# Altium footprint library Package_DFN_QFN.PcbLib: 735 footprints (part 9 of 46)
Each footprint in its own frame and in the unit in brackets; x right, y up, seen from the top. Pads: shape width x height; smd on the part's side, far side on the other; paste and mask are expansions set on the pad; w line width, h text height; cw(c..) or ccw(c..) is an arc to the next point about the centre after c.
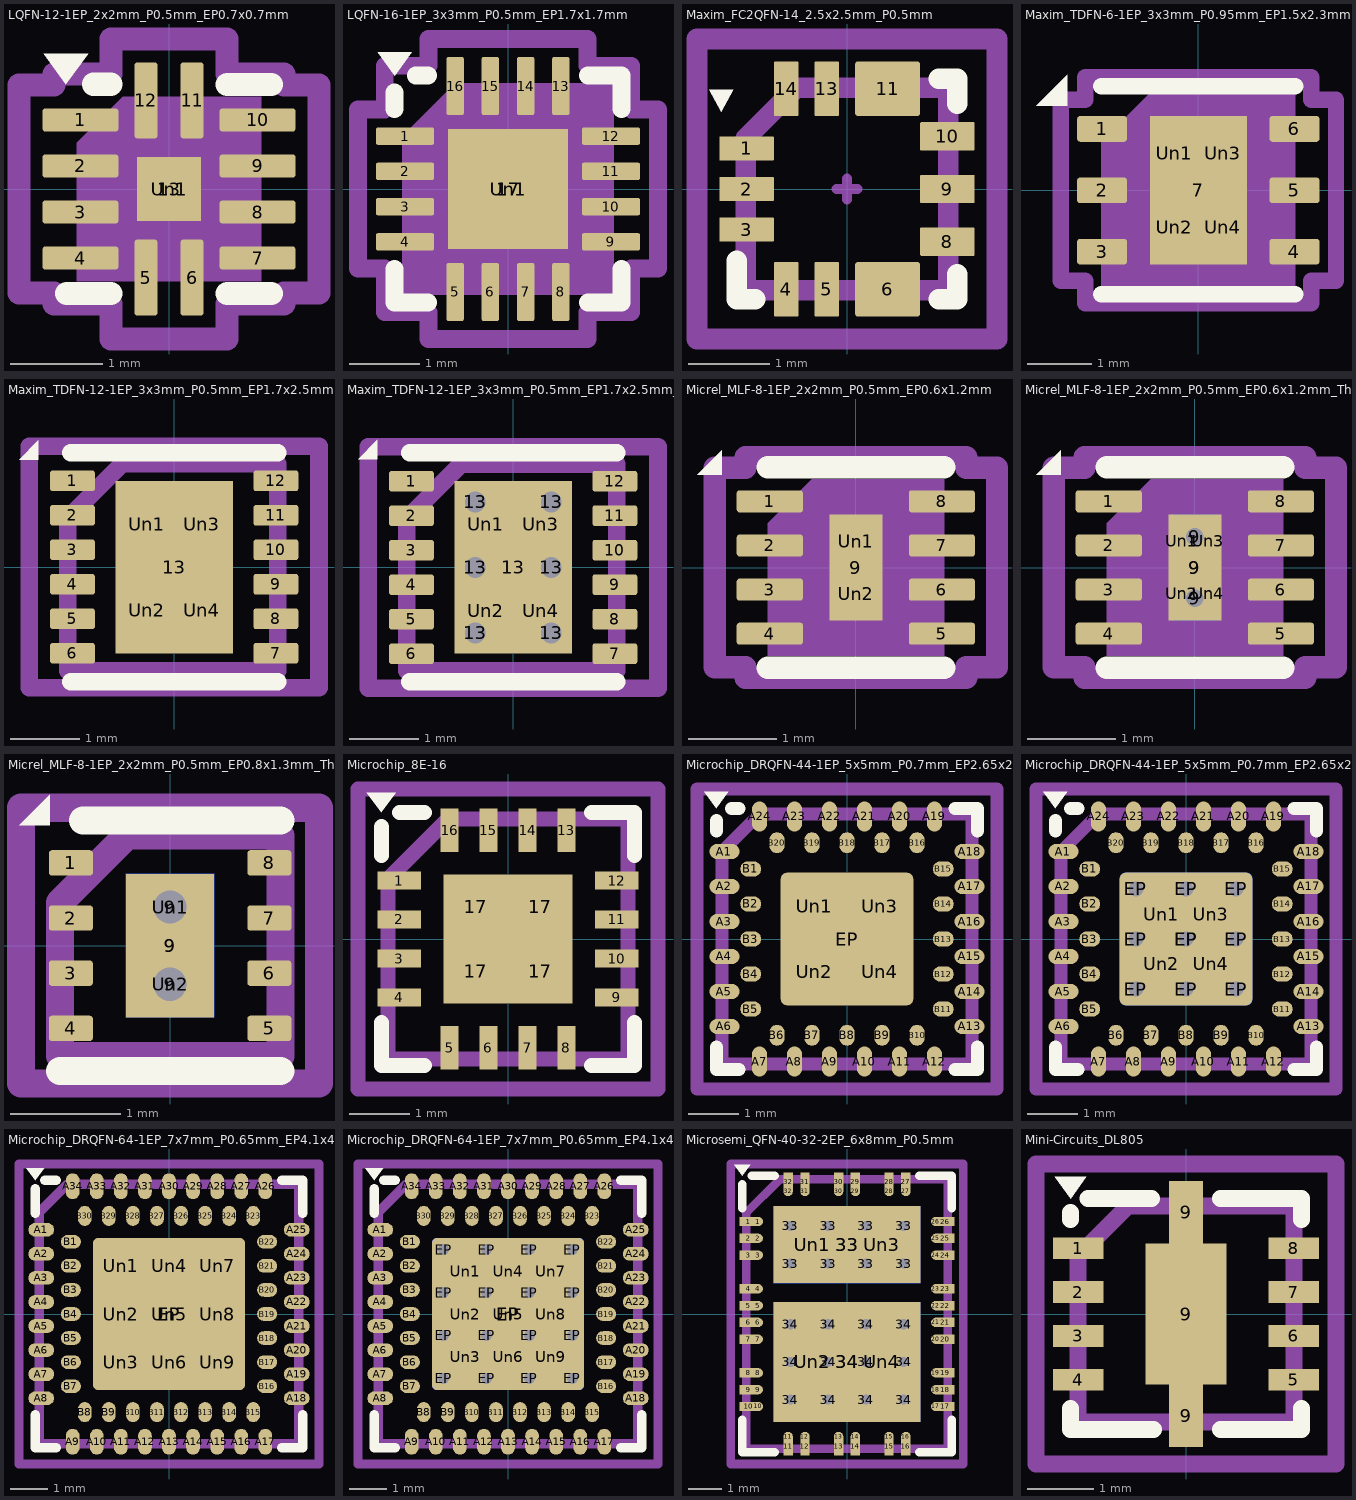
[diagram p8: the footprints below, top view; thin cyan lines are the x and y axes]

## LQFN-12-1EP_2x2mm_P0.5mm_EP0.7x0.7mm [mm] "LQFN-12-1EP_2x2mm_P0.5mm_EP0.7x0.7mm"
pads (14):
  rrect25% 0.825x0.25 smd: 1(-0.962,0.75) 2(-0.962,0.25) 3(-0.962,-0.25) 4(-0.962,-0.75) 7(0.962,-0.75) 8(0.962,-0.25) 9(0.962,0.25) 10(0.962,0.75)
  rrect25% 0.25x0.825 smd: 5(-0.25,-0.962) 6(0.25,-0.962) 11(0.25,0.962) 12(-0.25,0.962)
  rect 0.7x0.7 smd: 13(0,0)
  rrect25% 0.56x0.56 on Top Paste: Un1(0,0)
F.SilkS:
  region: -1.12,1.14 -1.36,1.47 -0.88,1.47
  lines w0.254: -1.11,-1.135 -0.635,-1.135 ; -0.82,1.14 -0.635,1.14 ; 0.635,-1.135 1.11,-1.135 ; 0.635,1.135 1.11,1.135
Top Component Center:
  lines w0.127: -0.127,0 0.127,0 -0.127,0 ; 0,-0.127 0,0.127 0,-0.127
Top Assembly:
  region: 1,-1 -1,-1 -1,0.5 -0.5,1 1,1
Top Courtyard:
  lines w0.254: -1.63,-1.13 -1.25,-1.13 -1.25,-1.25 -0.63,-1.25 -0.63,-1.63 0.63,-1.63 0.63,-1.25 1.25,-1.25 1.25,-1.13 1.63,-1.13 1.63,1.13 1.25,1.13 1.25,1.25 0.63,1.25 0.63,1.63 -0.63,1.63 -0.63,1.25 -1.25,1.25 -1.25,1.13 -1.63,1.13 -1.63,-1.13
Top Designator:
  text ".Designator" at -2.251,-0.226 h1

## LQFN-16-1EP_3x3mm_P0.5mm_EP1.7x1.7mm [mm] "LQFN-16-1EP_3x3mm_P0.5mm_EP1.7x1.7mm"
pads (18):
  rrect25% 0.825x0.25 smd: 1(-1.462,0.75) 2(-1.462,0.25) 3(-1.462,-0.25) 4(-1.462,-0.75) 9(1.462,-0.75) 10(1.462,-0.25) 11(1.462,0.25) 12(1.462,0.75)
  rrect25% 0.25x0.825 smd: 5(-0.75,-1.462) 6(-0.25,-1.462) 7(0.25,-1.462) 8(0.75,-1.462) 13(0.75,1.462) 14(0.25,1.462) 15(-0.25,1.462) 16(-0.75,1.462)
  rect 1.7x1.7 smd: 17(0,0)
  rrect18% 1.37x1.37 on Top Paste: Un1(0,0)
F.SilkS:
  region: -1.61,1.61 -1.85,1.94 -1.37,1.94
  lines w0.254: -1.61,-1.135 -1.61,-1.61 -1.135,-1.61 ; -1.61,1.135 -1.61,1.37 ; -1.31,1.61 -1.135,1.61 ; 1.135,-1.61 1.61,-1.61 1.61,-1.135 ; 1.135,1.61 1.61,1.61 1.61,1.135
Top Component Center:
  lines w0.127: -0.127,0 0.127,0 -0.127,0 ; 0,-0.127 0,0.127 0,-0.127
Top Assembly:
  region: 1.5,-1.5 -1.5,-1.5 -1.5,0.75 -0.75,1.5 1.5,1.5
Top Courtyard:
  lines w0.254: -2.13,-1.13 -1.75,-1.13 -1.75,-1.75 -1.13,-1.75 -1.13,-2.13 1.13,-2.13 1.13,-1.75 1.75,-1.75 1.75,-1.13 2.13,-1.13 2.13,1.13 1.75,1.13 1.75,1.75 1.13,1.75 1.13,2.13 -1.13,2.13 -1.13,1.75 -1.75,1.75 -1.75,1.13 -2.13,1.13 -2.13,-1.13
Top Designator:
  text ".Designator" at -3.43,-0.344 h1.52

## Maxim_FC2QFN-14_2.5x2.5mm_P0.5mm [mm] "Maxim_FC2QFN-14_2.5x2.5mm_P0.5mm"
pads (12):
  rrect10% 0.675x0.3 smd: 1(-1.238,0.5) 2(-1.238,0) 3(-1.238,-0.5)
  rrect10% 0.3x0.675 smd: 4(-0.75,-1.238) 5(-0.25,-1.238) 13(-0.25,1.238) 14(-0.75,1.238)
  rrect10% 0.8x0.675 smd: 6(0.5,-1.238) 11(0.5,1.238)
  rrect10% 0.675x0.35 smd: 8(1.238,-0.65) 9(1.238,0) 10(1.238,0.65)
F.SilkS:
  region: -1.55,0.95 -1.7,1.226 -1.4,1.226
  lines w0.254: -1.36,-0.885 -1.36,-1.36 -1.135,-1.36 ; 1.135,-1.36 1.36,-1.36 1.36,-1.05 ; 1.135,1.36 1.36,1.36 1.36,1.05
Top Component Center:
  lines w0.127: -0.127,0 0.127,0 -0.127,0 ; 0,-0.127 0,0.127 0,-0.127
Top Assembly:
  lines w0.254: -1.25,-1.25 -1.25,0.625 -0.625,1.25 1.25,1.25 1.25,-1.25 -1.25,-1.25
Top Courtyard:
  lines w0.254: -1.85,-1.85 -1.85,1.85 1.85,1.85 1.85,-1.85 -1.85,-1.85
Top Designator:
  text ".Designator" at -3.43,-0.344 h1.52

## Maxim_TDFN-6-1EP_3x3mm_P0.95mm_EP1.5x2.3mm [mm] "Maxim_TDFN-6-1EP_3x3mm_P0.95mm_EP1.5x2.3mm"
pads (11):
  rrect25% 0.775x0.4 smd: 1(-1.488,0.95) 2(-1.488,0) 3(-1.488,-0.95) 4(1.488,-0.95) 5(1.488,0) 6(1.488,0.95)
  rect 1.5x2.3 smd: 7(0,0)
  rrect25% 0.6x0.93 on Top Paste: Un1(-0.375,0.575) Un2(-0.375,-0.575) Un3(0.375,0.575) Un4(0.375,-0.575)
F.SilkS:
  region: -2.03,1.31 -2.51,1.31 -2.03,1.79
  lines w0.254: -1.5,-1.61 1.5,-1.61 ; -1.5,1.61 1.5,1.61
Top Component Center:
  lines w0.127: -0.127,0 0.127,0 -0.127,0 ; 0,-0.127 0,0.127 0,-0.127
Top Assembly:
  region: 1.5,-1.5 -1.5,-1.5 -1.5,0.75 -0.75,1.5 1.5,1.5
Top Courtyard:
  lines w0.254: -2.13,-1.4 -1.75,-1.4 -1.75,-1.75 1.75,-1.75 1.75,-1.4 2.13,-1.4 2.13,1.4 1.75,1.4 1.75,1.75 -1.75,1.75 -1.75,1.4 -2.13,1.4 -2.13,-1.4
Top Designator:
  text ".Designator" at -3.43,-0.344 h1.52

## Maxim_TDFN-12-1EP_3x3mm_P0.5mm_EP1.7x2.5mm [mm] "Maxim_TDFN-12-1EP_3x3mm_P0.5mm_EP1.7x2.5mm"
pads (17):
  rrect25% 0.65x0.3 smd: 1(-1.475,1.25) 2(-1.475,0.75) 3(-1.475,0.25) 4(-1.475,-0.25) 5(-1.475,-0.75) 6(-1.475,-1.25) 7(1.475,-1.25) 8(1.475,-0.75) 9(1.475,-0.25) 10(1.475,0.25) 11(1.475,0.75) 12(1.475,1.25)
  rect 1.7x2.5 smd: 13(0,0)
  rrect25% 0.64x1.01 on Top Paste: Un1(-0.4,0.625) Un2(-0.4,-0.625) Un3(0.4,0.625) Un4(0.4,-0.625)
F.SilkS:
  region: -1.97,1.56 -2.25,1.56 -1.97,1.84
  lines w0.254: -1.5,-1.66 1.5,-1.66 ; -1.5,1.66 1.5,1.66
Top Component Center:
  lines w0.127: -0.127,0 0.127,0 -0.127,0 ; 0,-0.127 0,0.127 0,-0.127
Top Assembly:
  lines w0.254: -1.54,0.75 -1.54,-1.5 1.5,-1.5 1.5,1.5 -0.75,1.5 -1.5,0.75
Top Courtyard:
  lines w0.254: -2.1,-1.75 2.1,-1.75 2.1,1.75 -2.1,1.75 -2.1,-1.75
Top Designator:
  text ".Designator" at -3.43,-0.344 h1.52

## Maxim_TDFN-12-1EP_3x3mm_P0.5mm_EP1.7x2.5mm_ThermalVias [mm] "Maxim_TDFN-12-1EP_3x3mm_P0.5mm_EP1.7x2.5mm_ThermalVias"
pads (23):
  rrect25% 0.65x0.3 smd: 1(-1.475,1.25) 2(-1.475,0.75) 3(-1.475,0.25) 4(-1.475,-0.25) 5(-1.475,-0.75) 6(-1.475,-1.25) 7(1.475,-1.25) 8(1.475,-0.75) 9(1.475,-0.25) 10(1.475,0.25) 11(1.475,0.75) 12(1.475,1.25)
  round 0.6 hole 0.3: 13(-0.55,-0.95) 13(-0.55,0) 13(-0.55,0.95) 13(0.55,-0.95) 13(0.55,0) 13(0.55,0.95)
  rect 1.7x2.5 smd: 13(0,0)
  rrect25% 0.64x1.01 on Top Paste: Un1(-0.4,0.625) Un2(-0.4,-0.625) Un3(0.4,0.625) Un4(0.4,-0.625)
F.SilkS:
  region: -1.97,1.57 -2.25,1.57 -1.97,1.85
  lines w0.254: -1.5,-1.66 1.5,-1.66 ; -1.5,1.66 1.5,1.66
Top Component Center:
  lines w0.127: -0.127,0 0.127,0 -0.127,0 ; 0,-0.127 0,0.127 0,-0.127
Top Assembly:
  lines w0.254: -1.54,0.75 -1.54,-1.5 1.5,-1.5 1.5,1.5 -0.75,1.5 -1.5,0.75
Top Courtyard:
  lines w0.254: -2.1,-1.75 2.1,-1.75 2.1,1.75 -2.1,1.75 -2.1,-1.75
Top Designator:
  text ".Designator" at -3.43,-0.344 h1.52

## Micrel_MLF-8-1EP_2x2mm_P0.5mm_EP0.6x1.2mm [mm] "Micrel_MLF-8-1EP_2x2mm_P0.5mm_EP0.6x1.2mm"
pads (11):
  rrect25% 0.75x0.25 smd: 1(-0.975,0.75) 2(-0.975,0.25) 3(-0.975,-0.25) 4(-0.975,-0.75) 5(0.975,-0.75) 6(0.975,-0.25) 7(0.975,0.25) 8(0.975,0.75)
  rect 0.6x1.2 smd: 9(0,0)
  rrect25% 0.48x0.48 on Top Paste: Un1(0,0.3) Un2(0,-0.3)
F.SilkS:
  region: -1.52,1.05 -1.8,1.05 -1.52,1.33
  lines w0.254: -1,-1.135 1,-1.135 ; -1,1.135 1,1.135
Top Component Center:
  lines w0.127: -0.127,0 0.127,0 -0.127,0 ; 0,-0.127 0,0.127 0,-0.127
Top Assembly:
  region: 1,-1 -1,-1 -1,0.5 -0.5,1 1,1
Top Courtyard:
  lines w0.254: -1.6,-1.13 -1.6,1.13 -1.25,1.13 -1.25,1.25 1.25,1.25 1.25,1.13 1.6,1.13 1.6,-1.13 1.25,-1.13 1.25,-1.25 -1.25,-1.25 -1.25,-1.13 -1.6,-1.13
Top Designator:
  text ".Designator" at -2.251,-0.226 h1
3D body "Micrel_MLF-8-1EP_2x2mm_P0.5mm_EP0.6x1.2mm.step": height 0.87, standoff 0, extent -1,-0.985 1,0.985

## Micrel_MLF-8-1EP_2x2mm_P0.5mm_EP0.6x1.2mm_ThermalVias [mm] "Micrel_MLF-8-1EP_2x2mm_P0.5mm_EP0.6x1.2mm_ThermalVias"
pads (16):
  rrect25% 0.75x0.25 smd: 1(-0.975,0.75) 2(-0.975,0.25) 3(-0.975,-0.25) 4(-0.975,-0.75) 5(0.975,-0.75) 6(0.975,-0.25) 7(0.975,0.25) 8(0.975,0.75)
  round 0.5 hole 0.2: 9(0,-0.35) 9(0,0.35)
  rect 0.6x1.2 smd: 9(0,0)
  rect 0.5x1.2 smd far side: 9(0,0)
  rrect25% 0.24x0.48 on Top Paste: Un1(-0.15,0.3) Un2(-0.15,-0.3) Un3(0.15,0.3) Un4(0.15,-0.3)
F.SilkS:
  region: -1.52,1.05 -1.8,1.05 -1.52,1.33
  lines w0.254: -1,-1.135 1,-1.135 ; -1,1.135 1,1.135
Top Component Center:
  lines w0.127: -0.127,0 0.127,0 -0.127,0 ; 0,-0.127 0,0.127 0,-0.127
Top Assembly:
  region: 1,-1 -1,-1 -1,0.5 -0.5,1 1,1
Top Courtyard:
  lines w0.254: -1.6,-1.13 -1.6,1.13 -1.25,1.13 -1.25,1.25 1.25,1.25 1.25,1.13 1.6,1.13 1.6,-1.13 1.25,-1.13 1.25,-1.25 -1.25,-1.25 -1.25,-1.13 -1.6,-1.13
Top Designator:
  text ".Designator" at -2.251,-0.226 h1
3D body "Micrel_MLF-8-1EP_2x2mm_P0.5mm_EP0.6x1.2mm.step": height 0.87, standoff 0, extent -1,-0.985 1,0.985

## Micrel_MLF-8-1EP_2x2mm_P0.5mm_EP0.8x1.3mm_ThermalVias [mm] "Micrel_MLF-8-1EP_2x2mm_P0.5mm_EP0.8x1.3mm_ThermalVias"
pads (14):
  rrect25% 0.4x0.23 smd: 1(-0.9,0.75) 2(-0.9,0.25) 3(-0.9,-0.25) 4(-0.9,-0.75) 5(0.9,-0.75) 6(0.9,-0.25) 7(0.9,0.25) 8(0.9,0.75)
  round 0.6 hole 0.3: 9(0,-0.35) 9(0,0.35)
  rect 0.8x1.3 smd: 9(0,0)
  rect 0.8x1.3 smd far side: 9(0,0)
  rrect25% 0.55x0.55 on Top Paste: Un1(0,0.35) Un2(0,-0.35)
F.SilkS:
  region: -1.09,1.09 -1.37,1.09 -1.09,1.37
  lines w0.254: -1,-1.135 1,-1.135 ; -0.79,1.135 1,1.135
Top Component Center:
  lines w0.127: -0.127,0 0.127,0 -0.127,0 ; 0,-0.127 0,0.127 0,-0.127
Top Assembly:
  lines w0.254: -1,0.38 -1,-1 1,-1 1,1 -0.39,1 -1,0.39
Top Courtyard:
  lines w0.254: -1.35,-1.25 1.35,-1.25 1.35,1.25 -1.35,1.25 -1.35,-1.25
Top Designator:
  text ".Designator" at -2.251,-0.226 h1
3D body "Micrel_MLF-8-1EP_2x2mm_P0.5mm_EP0.6x1.2mm.step": height 0.87, standoff 0, extent -1,-0.985 1,0.985

## Microchip_8E-16 [mm] "Microchip_8E-16"
pads (20):
  rect 0.725x0.3 smd: 1(-1.813,0.975) 2(-1.813,0.325) 3(-1.813,-0.325) 4(-1.813,-0.975) 9(1.813,-0.975) 10(1.813,-0.325) 11(1.813,0.325) 12(1.813,0.975)
  rect 0.3x0.725 smd: 5(-0.975,-1.813) 6(-0.325,-1.813) 7(0.325,-1.813) 8(0.975,-1.813) 13(0.975,1.813) 14(0.325,1.813) 15(-0.325,1.813) 16(-0.975,1.813)
  rect 1.075x1.075 smd: 17(-0.537,-0.537) 17(-0.537,0.537) 17(0.537,-0.537) 17(0.537,0.537)
F.SilkS:
  region: -2.11,2.11 -2.35,2.44 -1.87,2.44
  lines w0.254: -2.11,-1.39 -2.11,-2.11 -1.39,-2.11 ; -2.11,1.39 -2.11,1.87 ; -1.81,2.11 -1.39,2.11 ; 1.39,-2.11 2.11,-2.11 2.11,-1.39 ; 1.39,2.11 2.11,2.11 2.11,1.39
Top Component Center:
  lines w0.127: -0.127,0 0.127,0 -0.127,0 ; 0,-0.127 0,0.127 0,-0.127
Top Assembly:
  lines w0.254: -2,-2 2,-2 2,2 -1,2 -2,1 -2,-2
Top Courtyard:
  lines w0.254: -2.5,-2.5 2.5,-2.5 2.5,2.5 -2.5,2.5 -2.5,-2.5
Top Designator:
  text ".Designator" at -3.58,-0.344 h1.52

## Microchip_DRQFN-44-1EP_5x5mm_P0.7mm_EP2.65x2.65mm [mm] "Microchip_DRQFN-44-1EP_5x5mm_P0.7mm_EP2.65x2.65mm"
pads (49):
  rrect100% 0.6x0.3 smd: A1(-2.45,1.75) A2(-2.45,1.05) A3(-2.45,0.35) A4(-2.45,-0.35) A5(-2.45,-1.05) A6(-2.45,-1.75) A13(2.45,-1.75) A14(2.45,-1.05) A15(2.45,-0.35) A16(2.45,0.35) A17(2.45,1.05) A18(2.45,1.75)
  rrect100% 0.3x0.6 smd: A7(-1.75,-2.45) A8(-1.05,-2.45) A9(-0.35,-2.45) A10(0.35,-2.45) A11(1.05,-2.45) A12(1.75,-2.45) A19(1.75,2.45) A20(1.05,2.45) A21(0.35,2.45) A22(-0.35,2.45) A23(-1.05,2.45) A24(-1.75,2.45)
  rrect100% 0.42x0.3 smd: B1(-1.925,1.4) B2(-1.925,0.7) B3(-1.925,0) B4(-1.925,-0.7) B5(-1.925,-1.4) B11(1.925,-1.4) B12(1.925,-0.7) B13(1.925,0) B14(1.925,0.7) B15(1.925,1.4)
  rrect100% 0.3x0.42 smd: B6(-1.4,-1.925) B7(-0.7,-1.925) B8(0,-1.925) B9(0.7,-1.925) B10(1.4,-1.925) B16(1.4,1.925) B17(0.7,1.925) B18(0,1.925) B19(-0.7,1.925) B20(-1.4,1.925)
  rrect9% 2.65x2.65 smd: EP(0,0)
  rrect10% 1.1x1.1 on Top Paste: Un1(-0.65,0.65) Un2(-0.65,-0.65) Un3(0.65,0.65) Un4(0.65,-0.65)
F.SilkS:
  region: -2.61,2.61 -2.85,2.94 -2.37,2.94
  lines w0.254: -2.61,-2.16 -2.61,-2.61 -2.16,-2.61 ; -2.61,2.16 -2.61,2.37 ; -2.31,2.61 -2.16,2.61 ; 2.16,-2.61 2.61,-2.61 2.61,-2.16 ; 2.16,2.61 2.61,2.61 2.61,2.16
Top Component Center:
  lines w0.127: -0.127,0 0.127,0 -0.127,0 ; 0,-0.127 0,0.127 0,-0.127
Top Assembly:
  lines w0.254: -2.5,-2.5 2.5,-2.5 2.5,2.5 -1.75,2.5 -2.5,1.75 -2.5,-2.5
Top Courtyard:
  lines w0.254: -3,-3 3,-3 3,3 -3,3 -3,-3
Top Designator:
  text ".Designator" at -3.43,-0.344 h1.52

## Microchip_DRQFN-44-1EP_5x5mm_P0.7mm_EP2.65x2.65mm_ThermalVias [mm] "Microchip_DRQFN-44-1EP_5x5mm_P0.7mm_EP2.65x2.65mm_ThermalVias"
pads (59):
  rrect100% 0.6x0.3 smd: A1(-2.45,1.75) A2(-2.45,1.05) A3(-2.45,0.35) A4(-2.45,-0.35) A5(-2.45,-1.05) A6(-2.45,-1.75) A13(2.45,-1.75) A14(2.45,-1.05) A15(2.45,-0.35) A16(2.45,0.35) A17(2.45,1.05) A18(2.45,1.75)
  rrect100% 0.3x0.6 smd: A7(-1.75,-2.45) A8(-1.05,-2.45) A9(-0.35,-2.45) A10(0.35,-2.45) A11(1.05,-2.45) A12(1.75,-2.45) A19(1.75,2.45) A20(1.05,2.45) A21(0.35,2.45) A22(-0.35,2.45) A23(-1.05,2.45) A24(-1.75,2.45)
  rrect100% 0.42x0.3 smd: B1(-1.925,1.4) B2(-1.925,0.7) B3(-1.925,0) B4(-1.925,-0.7) B5(-1.925,-1.4) B11(1.925,-1.4) B12(1.925,-0.7) B13(1.925,0) B14(1.925,0.7) B15(1.925,1.4)
  rrect100% 0.3x0.42 smd: B6(-1.4,-1.925) B7(-0.7,-1.925) B8(0,-1.925) B9(0.7,-1.925) B10(1.4,-1.925) B16(1.4,1.925) B17(0.7,1.925) B18(0,1.925) B19(-0.7,1.925) B20(-1.4,1.925)
  round 0.6 hole 0.3: EP(-1,-1) EP(-1,0) EP(-1,1) EP(0,-1) EP(0,0) EP(0,1) EP(1,-1) EP(1,0) EP(1,1)
  rrect9% 2.65x2.65 smd: EP(0,0)
  rrect9% 2.65x2.65 smd far side: EP(0,0)
  rrect25% 0.85x0.85 on Top Paste: Un1(-0.5,0.5) Un2(-0.5,-0.5) Un3(0.5,0.5) Un4(0.5,-0.5)
F.SilkS:
  region: -2.61,2.61 -2.85,2.94 -2.37,2.94
  lines w0.254: -2.61,-2.16 -2.61,-2.61 -2.16,-2.61 ; -2.61,2.16 -2.61,2.37 ; -2.31,2.61 -2.16,2.61 ; 2.16,-2.61 2.61,-2.61 2.61,-2.16 ; 2.16,2.61 2.61,2.61 2.61,2.16
Top Component Center:
  lines w0.127: -0.127,0 0.127,0 -0.127,0 ; 0,-0.127 0,0.127 0,-0.127
Top Assembly:
  lines w0.254: -2.5,-2.5 -2.5,1.75 -1.75,2.5 2.5,2.5 2.5,-2.5 -2.5,-2.5
Top Courtyard:
  lines w0.254: -3,-3 -3,3 3,3 3,-3 -3,-3
Top Designator:
  text ".Designator" at -3.43,-0.344 h1.52

## Microchip_DRQFN-64-1EP_7x7mm_P0.65mm_EP4.1x4.1mm [mm] "Microchip_DRQFN-64-1EP_7x7mm_P0.65mm_EP4.1x4.1mm"
pads (74):
  rrect100% 0.7x0.37 smd: A1(-3.45,2.275) A2(-3.45,1.625) A3(-3.45,0.975) A4(-3.45,0.325) A5(-3.45,-0.325) A6(-3.45,-0.975) A7(-3.45,-1.625) A8(-3.45,-2.275) A18(3.45,-2.275) A19(3.45,-1.625) A20(3.45,-0.975) A21(3.45,-0.325) A22(3.45,0.325) A23(3.45,0.975) A24(3.45,1.625) A25(3.45,2.275)
  rrect100% 0.37x0.7 smd: A9(-2.6,-3.45) A10(-1.95,-3.45) A11(-1.3,-3.45) A12(-0.65,-3.45) A13(0,-3.45) A14(0.65,-3.45) A15(1.3,-3.45) A16(1.95,-3.45) A17(2.6,-3.45) A26(2.6,3.45) A27(1.95,3.45) A28(1.3,3.45) A29(0.65,3.45) A30(0,3.45) A31(-0.65,3.45) A32(-1.3,3.45) A33(-1.95,3.45) A34(-2.6,3.45)
  rrect100% 0.54x0.37 smd: B1(-2.65,1.95) B2(-2.65,1.3) B3(-2.65,0.65) B4(-2.65,0) B5(-2.65,-0.65) B6(-2.65,-1.3) B7(-2.65,-1.95) B16(2.65,-1.95) B17(2.65,-1.3) B18(2.65,-0.65) B19(2.65,0) B20(2.65,0.65) B21(2.65,1.3) B22(2.65,1.95)
  rrect100% 0.37x0.54 smd: B8(-2.275,-2.65) B9(-1.625,-2.65) B10(-0.975,-2.65) B11(-0.325,-2.65) B12(0.325,-2.65) B13(0.975,-2.65) B14(1.625,-2.65) B15(2.275,-2.65) B23(2.275,2.65) B24(1.625,2.65) B25(0.975,2.65) B26(0.325,2.65) B27(-0.325,2.65) B28(-0.975,2.65) B29(-1.625,2.65) B30(-2.275,2.65)
  rrect6% 4.1x4.1 smd: EP(0,0)
  rrect10% 1.15x1.15 on Top Paste: Un1(-1.3,1.3) Un2(-1.3,0) Un3(-1.3,-1.3) Un4(0,1.3) Un5(0,0) Un6(0,-1.3) Un7(1.3,1.3) Un8(1.3,0) Un9(1.3,-1.3)
F.SilkS:
  region: -3.61,3.61 -3.85,3.94 -3.37,3.94
  lines w0.254: -3.61,-2.72 -3.61,-3.61 -3.045,-3.61 ; -3.61,2.72 -3.61,3.38 ; -3.35,3.61 -3.045,3.61 ; 3.045,-3.61 3.61,-3.61 3.61,-2.72 ; 3.045,3.61 3.61,3.61 3.61,2.72
Top Component Center:
  lines w0.127: -0.127,0 0.127,0 -0.127,0 ; 0,-0.127 0,0.127 0,-0.127
Top Assembly:
  lines w0.254: -3.5,-3.5 3.5,-3.5 3.5,3.5 -2.75,3.5 -3.5,2.75 -3.5,-3.5
Top Courtyard:
  lines w0.254: -4.05,-4.05 4.05,-4.05 4.05,4.05 -4.05,4.05 -4.05,-4.05
Top Designator:
  text ".Designator" at -3.44,-0.344 h1.52

## Microchip_DRQFN-64-1EP_7x7mm_P0.65mm_EP4.1x4.1mm_ThermalVias [mm] "Microchip_DRQFN-64-1EP_7x7mm_P0.65mm_EP4.1x4.1mm_ThermalVias"
pads (91):
  rrect100% 0.7x0.37 smd: A1(-3.45,2.275) A2(-3.45,1.625) A3(-3.45,0.975) A4(-3.45,0.325) A5(-3.45,-0.325) A6(-3.45,-0.975) A7(-3.45,-1.625) A8(-3.45,-2.275) A18(3.45,-2.275) A19(3.45,-1.625) A20(3.45,-0.975) A21(3.45,-0.325) A22(3.45,0.325) A23(3.45,0.975) A24(3.45,1.625) A25(3.45,2.275)
  rrect100% 0.37x0.7 smd: A9(-2.6,-3.45) A10(-1.95,-3.45) A11(-1.3,-3.45) A12(-0.65,-3.45) A13(0,-3.45) A14(0.65,-3.45) A15(1.3,-3.45) A16(1.95,-3.45) A17(2.6,-3.45) A26(2.6,3.45) A27(1.95,3.45) A28(1.3,3.45) A29(0.65,3.45) A30(0,3.45) A31(-0.65,3.45) A32(-1.3,3.45) A33(-1.95,3.45) A34(-2.6,3.45)
  rrect100% 0.54x0.37 smd: B1(-2.65,1.95) B2(-2.65,1.3) B3(-2.65,0.65) B4(-2.65,0) B5(-2.65,-0.65) B6(-2.65,-1.3) B7(-2.65,-1.95) B16(2.65,-1.95) B17(2.65,-1.3) B18(2.65,-0.65) B19(2.65,0) B20(2.65,0.65) B21(2.65,1.3) B22(2.65,1.95)
  rrect100% 0.37x0.54 smd: B8(-2.275,-2.65) B9(-1.625,-2.65) B10(-0.975,-2.65) B11(-0.325,-2.65) B12(0.325,-2.65) B13(0.975,-2.65) B14(1.625,-2.65) B15(2.275,-2.65) B23(2.275,2.65) B24(1.625,2.65) B25(0.975,2.65) B26(0.325,2.65) B27(-0.325,2.65) B28(-0.975,2.65) B29(-1.625,2.65) B30(-2.275,2.65)
  round 0.6 hole 0.3: EP(-1.74,-1.74) EP(-1.74,-0.58) EP(-1.74,0.58) EP(-1.74,1.74) EP(-0.58,-1.74) EP(-0.58,-0.58) EP(-0.58,0.58) EP(-0.58,1.74) EP(0.58,-1.74) EP(0.58,-0.58) EP(0.58,0.58) EP(0.58,1.74) EP(1.74,-1.74) EP(1.74,-0.58) EP(1.74,0.58) EP(1.74,1.74)
  rrect6% 4.1x4.1 smd: EP(0,0)
  rrect6% 4.1x4.1 smd far side: EP(0,0)
  rrect25% 1x1 on Top Paste: Un1(-1.16,1.16) Un2(-1.16,0) Un3(-1.16,-1.16) Un4(0,1.16) Un5(0,0) Un6(0,-1.16) Un7(1.16,1.16) Un8(1.16,0) Un9(1.16,-1.16)
F.SilkS:
  region: -3.61,3.61 -3.85,3.94 -3.37,3.94
  lines w0.254: -3.61,-2.72 -3.61,-3.61 -3.045,-3.61 ; -3.61,2.72 -3.61,3.38 ; -3.35,3.61 -3.045,3.61 ; 3.045,-3.61 3.61,-3.61 3.61,-2.72 ; 3.045,3.61 3.61,3.61 3.61,2.72
Top Component Center:
  lines w0.127: -0.127,0 0.127,0 -0.127,0 ; 0,-0.127 0,0.127 0,-0.127
Top Assembly:
  lines w0.254: -3.5,-3.5 3.5,-3.5 3.5,3.5 -2.75,3.5 -3.5,2.75 -3.5,-3.5
Top Courtyard:
  lines w0.254: -4.05,-4.05 4.05,-4.05 4.05,4.05 -4.05,4.05 -4.05,-4.05
Top Designator:
  text ".Designator" at -3.43,-0.344 h1.52

## Microsemi_QFN-40-32-2EP_6x8mm_P0.5mm [mm] "Microsemi_QFN-40-32-2EP_6x8mm_P0.5mm"
pads (92):
  rect 0.56x0.28 smd: 1(-2.92,2.75) 2(-2.92,2.25) 3(-2.92,1.75) 4(-2.92,0.75) 5(-2.92,0.25) 6(-2.92,-0.25) 7(-2.92,-0.75) 8(-2.92,-1.75) 9(-2.92,-2.25) 10(-2.92,-2.75) 17(2.92,-2.75) 18(2.92,-2.25) 19(2.92,-1.75) 20(2.92,-0.75) 21(2.92,-0.25) 22(2.92,0.25) 23(2.92,0.75) 24(2.92,1.75) 25(2.92,2.25) 26(2.92,2.75)
  round 0.28 smd: 1(-2.64,2.75) 2(-2.64,2.25) 3(-2.64,1.75) 4(-2.64,0.75) 5(-2.64,0.25) 6(-2.64,-0.25) 7(-2.64,-0.75) 8(-2.64,-1.75) 9(-2.64,-2.25) 10(-2.64,-2.75) 11(-1.75,-3.645) 12(-1.25,-3.645) 13(-0.25,-3.645) 14(0.25,-3.645) 15(1.25,-3.645) 16(1.75,-3.645) 17(2.64,-2.75) 18(2.64,-2.25) 19(2.64,-1.75) 20(2.64,-0.75) 21(2.64,-0.25) 22(2.64,0.25) 23(2.64,0.75) 24(2.64,1.75) 25(2.64,2.25) 26(2.64,2.75) 27(1.75,3.645) 28(1.25,3.645) 29(0.25,3.645) 30(-0.25,3.645) 31(-1.25,3.645) 32(-1.75,3.645)
  rect 0.28x0.56 smd: 11(-1.75,-3.925) 12(-1.25,-3.925) 13(-0.25,-3.925) 14(0.25,-3.925) 15(1.25,-3.925) 16(1.75,-3.925) 27(1.75,3.925) 28(1.25,3.925) 29(0.25,3.925) 30(-0.25,3.925) 31(-1.25,3.925) 32(-1.75,3.925)
  round 0.6 hole 0.3: 33(-1.68,1.5) 33(-1.68,2.62) 33(-0.56,1.5) 33(-0.56,2.62) 33(0.56,1.5) 33(0.56,2.62) 33(1.68,1.5) 33(1.68,2.62) 34(-1.68,-2.545) 34(-1.68,-1.425) 34(-1.68,-0.305) 34(-0.56,-2.545) 34(-0.56,-1.425) 34(-0.56,-0.305) 34(0.56,-2.545) 34(0.56,-1.425) 34(0.56,-0.305) 34(1.68,-2.545) 34(1.68,-1.425) 34(1.68,-0.305)
  rect 4.37x2.29 smd: 33(0,2.06)
  rect 4.37x2.29 smd far side: 33(0,2.06)
  rect 4.37x3.56 smd: 34(0,-1.425)
  rect 4.37x3.56 smd far side: 34(0,-1.425)
  rect 1.68x1.68 on Top Paste: Un1(-1.04,2.06) Un3(1.04,2.06)
  rect 1.68x2.95 on Top Paste: Un2(-1.04,-1.425) Un4(1.04,-1.425)
F.SilkS:
  region: -3.11,4.11 -3.35,4.44 -2.87,4.44
  lines w0.254: -3.11,-3.15 -3.11,-4.11 -2.15,-4.11 ; -3.11,3.15 -3.11,3.86 ; -2.83,4.11 -2.15,4.11 ; 2.15,-4.11 3.11,-4.11 3.11,-3.15 ; 2.15,4.11 3.11,4.11 3.11,3.15
Top Component Center:
  lines w0.127: -0.127,0 0.127,0 -0.127,0 ; 0,-0.127 0,0.127 0,-0.127
Top Assembly:
  lines w0.254: -3,-4 3,-4 3,4 -2,4 -3,3 -3,-4
Top Courtyard:
  lines w0.254: -3.45,-4.46 3.45,-4.46 3.45,4.46 -3.45,4.46 -3.45,-4.46
Top Designator:
  text ".Designator" at -3.43,-0.344 h1.52

## Mini-Circuits_DL805 [mm] "Mini-Circuits_DL805"
pads (11):
  rect 0.76x0.33 smd: 1(-1.625,0.99) 2(-1.625,0.33) 3(-1.625,-0.33) 4(-1.625,-0.99) 5(1.625,-0.99) 6(1.625,-0.33) 7(1.625,0.33) 8(1.625,0.99)
  rect 0.51x0.94 smd: 9(0,-1.535) 9(0,1.535)
  rect 1.22x2.13 smd: 9(0,0)
F.SilkS:
  region: -1.74,1.74 -1.98,2.07 -1.5,2.07
  lines w0.254: -1.74,-1.42 -1.74,-1.74 -0.49,-1.74 ; -1.74,1.42 -1.74,1.53 ; -1.48,1.74 -0.52,1.74 ; 0.52,-1.74 1.74,-1.74 1.74,-1.42 ; 0.52,1.74 1.74,1.74 1.74,1.42
Top Component Center:
  lines w0.127: -0.127,0 0.127,0 -0.127,0 ; 0,-0.127 0,0.127 0,-0.127
Top Assembly:
  lines w0.254: -1.625,-1.625 1.625,-1.625 1.625,1.625 -0.875,1.625 -1.625,0.875 -1.625,-1.625
Top Courtyard:
  lines w0.254: -2.26,-2.26 2.26,-2.26 2.26,2.26 -2.26,2.26 -2.26,-2.26
Top Designator:
  text ".Designator" at -3.43,-0.344 h1.52